# Altium schematic symbol library ATX6-D.SchLib: 1 symbol
Pins are listed as number, name and electrical type; pins without a type are passive.

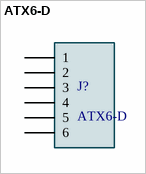
[diagram p0: symbol ATX6-D]

## ATX6-D
designator J?
Conn Power HDR 6 POS 4.2mm; MF: TE Connectivity; MP: 1586863-6; EU_RoHS_Compliance: Compliant; SnapEDA_Link: https://www.snapeda.com/parts/1586863-6/TE%20Connectivity%20AMP%20Connectors/view-part/1436757/?ref=snap; Price: None; Package: None; TE_purchase_URL: https://www.te.com/usa-en/product-1586863-6.html?te_bu=Cor&te_type=disp&te_campaign=seda_glo_cor-seda-global-disp-prtnr-fy19-seda-model-bom-cta_sma-317_1&elqCampaignId=32493; Value: *; Availability: Unavailable
footprint ATX6-D-RA
footprint ATX6-D-ST
pins: 1, 2, 3, 4, 5, 6